# Altium footprint library WR-TBL_Pluggable Connector_3.81mm.PcbLib: 201 footprints (part 10 of 13)
Each footprint in its own frame and in the unit in brackets; x right, y up, seen from the top. Pads: shape width x height; smd on the part's side, far side on the other; paste and mask are expansions set on the pad; w line width, h text height; cw(c..) or ccw(c..) is an arc to the next point about the centre after c.
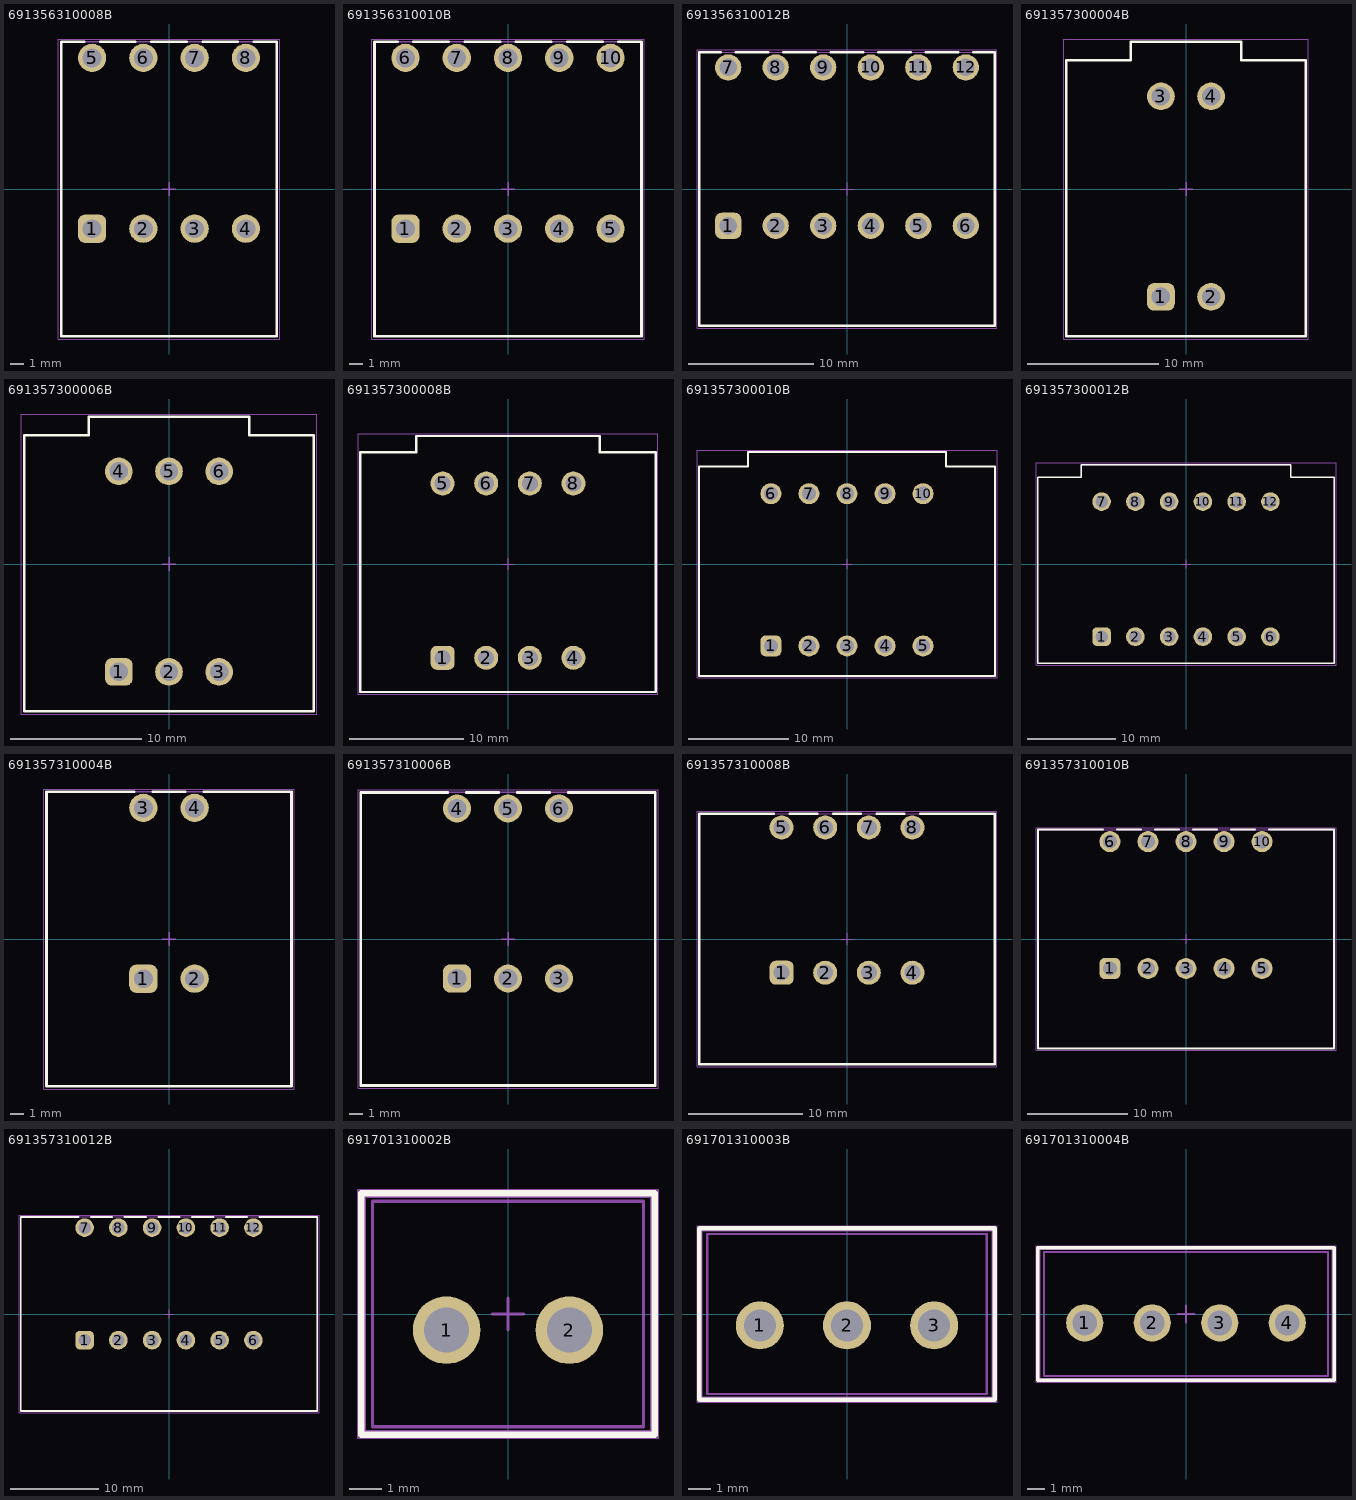
[diagram p9: the footprints below, top view; thin cyan lines are the x and y axes]

## 691356310008B [mm] "Double Level Horizontal Male PCB Header, pitch 3.81mm, 08p"
height 22.4
pads (8):
  rrect50% 2.1x2.1 hole 1.4: 1(-5.715,-2.95)
  round 2.1 hole 1.4: 2(-1.905,-2.95) 3(1.905,-2.95) 4(5.715,-2.95) 5(-5.715,9.75) 6(-1.905,9.75) 7(1.905,9.75) 8(5.715,9.75)
Top Overlay:
  lines w0.2: -6.315,10.95 -8.015,10.95 -8.015,-10.95 8.015,-10.95 8.015,10.95 6.315,10.95 ; -5.115,10.95 -2.505,10.95 ; -1.305,10.95 1.305,10.95 ; 2.505,10.95 5.115,10.95
Top Assembly:
  lines w0.1: -8.015,-10.95 8.015,-10.95 8.015,10.95 -8.015,10.95 -8.015,-10.95
Top Designator:
  text ".Designator" at -3.647,-0.357 h1
Top 3D Body:
  lines w0.1: -8.015,-10.95 -8.015,10.95 8.015,10.95 8.015,-10.95 -8.015,-10.95
Top Courtyard:
  lines w0.05: -8.215,-11.15 8.215,-11.15 8.215,11.15 -8.215,11.15 -8.215,-11.15
Top Component Center:
  lines w0.1: -0.5,0 0.5,0 ; 0,-0.5 0,0.5
3D body "691356310008B.stp": height 22.5, standoff -3.3, extent -8.015,-10.95 8.015,10.95

## 691356310010B [mm] "Double Level Horizontal Male PCB Header, pitch 3.81mm, 10p"
height 22.4
pads (10):
  rrect50% 2.1x2.1 hole 1.4: 1(-7.62,-2.95)
  round 2.1 hole 1.4: 2(-3.81,-2.95) 3(0,-2.95) 4(3.81,-2.95) 5(7.62,-2.95) 6(-7.62,9.75) 7(-3.81,9.75) 8(0,9.75) 9(3.81,9.75) 10(7.62,9.75)
Top Overlay:
  lines w0.2: -8.22,10.95 -9.92,10.95 -9.92,-10.95 9.92,-10.95 9.92,10.95 8.22,10.95 ; -7.02,10.95 -4.41,10.95 ; -3.21,10.95 -0.6,10.95 ; 0.6,10.95 3.21,10.95 ; 4.41,10.95 7.02,10.95
Top Assembly:
  lines w0.1: -9.92,-10.95 -9.92,10.95 9.92,10.95 9.92,-10.95 -9.92,-10.95
Top Designator:
  text ".Designator" at -3.647,-0.357 h1
Top 3D Body:
  lines w0.1: -9.92,-10.95 9.92,-10.95 9.92,10.95 -9.92,10.95 -9.92,-10.95
Top Courtyard:
  lines w0.05: -10.12,-11.15 -10.12,11.15 10.12,11.15 10.12,-11.15 -10.12,-11.15
Top Component Center:
  lines w0.1: -0.5,0 0.5,0 ; 0,-0.5 0,0.5
3D body "691356310010B.stp": height 22.5, standoff -3.3, extent -9.92,-10.95 9.92,10.95

## 691356310012B [mm] "Double Level Horizontal Male PCB Header, pitch 3.81mm, 12p"
height 22.4
pads (12):
  rrect50% 2.1x2.1 hole 1.4: 1(-9.525,-2.95)
  round 2.1 hole 1.4: 2(-5.715,-2.95) 3(-1.905,-2.95) 4(1.905,-2.95) 5(5.715,-2.95) 6(9.525,-2.95) 7(-9.525,9.75) 8(-5.715,9.75) 9(-1.905,9.75) 10(1.905,9.75) 11(5.715,9.75) 12(9.525,9.75)
Top Overlay:
  lines w0.2: -10.125,10.95 -11.825,10.95 -11.825,-10.95 11.825,-10.95 11.825,10.95 10.125,10.95 ; -8.925,10.95 -6.315,10.95 ; -5.115,10.95 -2.505,10.95 ; -1.305,10.95 1.305,10.95 ; 2.505,10.95 5.115,10.95 ; 6.315,10.95 8.925,10.95
Top Assembly:
  lines w0.1: -11.825,-10.95 11.825,-10.95 11.825,10.95 -11.825,10.95 -11.825,-10.95
Top Designator:
  text ".Designator" at -3.647,-0.357 h1
Top 3D Body:
  lines w0.1: -11.825,-10.95 -11.825,10.95 11.825,10.95 11.825,-10.95 -11.825,-10.95
Top Courtyard:
  lines w0.05: -12.025,-11.15 12.025,-11.15 12.025,11.15 -12.025,11.15 -12.025,-11.15
Top Component Center:
  lines w0.1: -0.5,0 0.5,0 ; 0,-0.5 0,0.5
3D body "691356310012B.stp": height 22.5, standoff -3.3, extent -11.825,-10.95 11.825,10.95

## 691357300004B [mm] "Double Level Vertical Male PCB Header with Flanges, pitch 3.81mm, 04p"
height 21.9
pads (4):
  rrect50% 2.1x2.1 hole 1.4: 1(-1.905,-8.2)
  round 2.1 hole 1.4: 2(1.905,-8.2) 3(-1.905,7.04) 4(1.905,7.04)
Top Overlay:
  lines w0.2: -9.105,-11.2 9.105,-11.2 9.105,9.78 4.2,9.78 4.2,11.2 -4.2,11.2 -4.2,9.78 -9.105,9.78 -9.105,-11.2
Top Assembly:
  lines w0.1: -9.105,-11.2 -9.105,9.78 -4.2,9.78 -4.2,11.2 4.2,11.2 4.2,9.78 9.105,9.78 9.105,-11.2 -9.105,-11.2
Top Designator:
  text ".Designator" at -3.647,-0.357 h1
Top 3D Body:
  lines w0.1: -9.105,-11.2 9.105,-11.2 9.105,9.78 4.2,9.78 4.2,11.2 -4.2,11.2 -4.2,9.78 -9.105,9.78 -9.105,-11.2
Top Courtyard:
  lines w0.05: -9.305,-11.4 9.305,-11.4 9.305,11.4 -9.305,11.4 -9.305,-11.4
Top Component Center:
  lines w0.1: -0.5,0 0.5,0 ; 0,-0.5 0,0.5
3D body "691357300004B.stp": height 21.95, standoff -3.35, extent -9.105,-11.2 9.105,11.2

## 691357300006B [mm] "Double Level Vertical Male PCB Header with Flanges, pitch 3.81mm, 06p"
height 21.9
pads (6):
  rrect50% 2.1x2.1 hole 1.4: 1(-3.81,-8.2)
  round 2.1 hole 1.4: 2(0,-8.2) 3(3.81,-8.2) 4(-3.81,7.04) 5(0,7.04) 6(3.81,7.04)
Top Overlay:
  lines w0.2: -11.01,-11.2 11.01,-11.2 11.01,9.78 6.105,9.78 6.105,11.2 -6.105,11.2 -6.105,9.78 -11.01,9.78 -11.01,-11.2
Top Assembly:
  lines w0.1: -11.01,-11.2 -11.01,9.78 -6.105,9.78 -6.105,11.2 6.105,11.2 6.105,9.78 11.01,9.78 11.01,-11.2 -11.01,-11.2
Top Designator:
  text ".Designator" at -3.647,-0.357 h1
Top 3D Body:
  lines w0.1: -11.01,-11.2 11.01,-11.2 11.01,9.78 6.105,9.78 6.105,11.2 -6.105,11.2 -6.105,9.78 -11.01,9.78 -11.01,-11.2
Top Courtyard:
  lines w0.05: -11.21,-11.4 11.21,-11.4 11.21,11.4 -11.21,11.4 -11.21,-11.4
Top Component Center:
  lines w0.1: -0.5,0 0.5,0 ; 0,-0.5 0,0.5
3D body "691357300006B.stp": height 21.95, standoff -3.35, extent -11.01,-11.2 11.01,11.2

## 691357300008B [mm] "Double Level Vertical Male PCB Header with Flanges, pitch 3.81mm, 08p"
height 21.9
pads (8):
  rrect50% 2.1x2.1 hole 1.4: 1(-5.715,-8.2)
  round 2.1 hole 1.4: 2(-1.905,-8.2) 3(1.905,-8.2) 4(5.715,-8.2) 5(-5.715,7.04) 6(-1.905,7.04) 7(1.905,7.04) 8(5.715,7.04)
Top Overlay:
  lines w0.2: -12.915,-11.2 -12.915,9.78 -8.01,9.78 -8.01,11.2 8.01,11.2 8.01,9.78 12.915,9.78 12.915,-11.2 -12.915,-11.2
Top Assembly:
  lines w0.1: -12.915,-11.2 12.915,-11.2 12.915,9.78 8.01,9.78 8.01,11.2 -8.01,11.2 -8.01,9.78 -12.915,9.78 -12.915,-11.2
Top Designator:
  text ".Designator" at -3.647,-0.357 h1
Top 3D Body:
  lines w0.1: -12.915,-11.2 -12.915,9.78 -8.01,9.78 -8.01,11.2 8.01,11.2 8.01,9.78 12.915,9.78 12.915,-11.2 -12.915,-11.2
Top Courtyard:
  lines w0.05: -13.115,-11.4 -13.115,11.4 13.115,11.4 13.115,-11.4 -13.115,-11.4
Top Component Center:
  lines w0.1: -0.5,0 0.5,0 ; 0,-0.5 0,0.5
3D body "691357300008B.stp": height 21.95, standoff -3.35, extent -12.915,-11.2 12.915,11.2

## 691357300010B [mm] "Double Level Vertical Male PCB Header with Flanges, pitch 3.81mm, 10p"
height 21.9
pads (10):
  rrect50% 2.1x2.1 hole 1.4: 1(-7.62,-8.2)
  round 2.1 hole 1.4: 2(-3.81,-8.2) 3(0,-8.2) 4(3.81,-8.2) 5(7.62,-8.2) 6(-7.62,7.04) 7(-3.81,7.04) 8(0,7.04) 9(3.81,7.04) 10(7.62,7.04)
Top Overlay:
  lines w0.2: -14.82,-11.2 14.82,-11.2 14.82,9.78 9.915,9.78 9.915,11.2 -9.915,11.2 -9.915,9.78 -14.82,9.78 -14.82,-11.2
Top Assembly:
  lines w0.1: -14.82,-11.2 -14.82,9.78 -9.915,9.78 -9.915,11.2 9.915,11.2 9.915,9.78 14.82,9.78 14.82,-11.2 -14.82,-11.2
Top Designator:
  text ".Designator" at -3.647,-0.357 h1
Top 3D Body:
  lines w0.1: -14.82,-11.2 14.82,-11.2 14.82,9.78 9.915,9.78 9.915,11.2 -9.915,11.2 -9.915,9.78 -14.82,9.78 -14.82,-11.2
Top Courtyard:
  lines w0.05: -15.02,-11.4 15.02,-11.4 15.02,11.4 -15.02,11.4 -15.02,-11.4
Top Component Center:
  lines w0.1: -0.5,0 0.5,0 ; 0,-0.5 0,0.5
3D body "691357300010B.stp": height 21.95, standoff -3.35, extent -14.82,-11.2 14.82,11.2

## 691357300012B [mm] "Double Level Vertical Male PCB Header with Flanges, pitch 3.81mm, 12p"
height 21.9
pads (12):
  rrect50% 2.1x2.1 hole 1.4: 1(-9.525,-8.2)
  round 2.1 hole 1.4: 2(-5.715,-8.2) 3(-1.905,-8.2) 4(1.905,-8.2) 5(5.715,-8.2) 6(9.525,-8.2) 7(-9.525,7.04) 8(-5.715,7.04) 9(-1.905,7.04) 10(1.905,7.04) 11(5.715,7.04) 12(9.525,7.04)
Top Overlay:
  lines w0.2: -16.725,-11.2 16.725,-11.2 16.725,9.78 11.82,9.78 11.82,11.2 -11.82,11.2 -11.82,9.78 -16.725,9.78 -16.725,-11.2
Top Assembly:
  lines w0.1: -16.725,-11.2 -16.725,9.78 -11.82,9.78 -11.82,11.2 11.82,11.2 11.82,9.78 16.725,9.78 16.725,-11.2 -16.725,-11.2
Top Designator:
  text ".Designator" at -3.647,-0.357 h1
Top 3D Body:
  lines w0.1: -16.725,-11.2 16.725,-11.2 16.725,9.78 11.82,9.78 11.82,11.2 -11.82,11.2 -11.82,9.78 -16.725,9.78 -16.725,-11.2
Top Courtyard:
  lines w0.05: -16.925,-11.4 16.925,-11.4 16.925,11.4 -16.925,11.4 -16.925,-11.4
Top Component Center:
  lines w0.1: -0.5,0 0.5,0 ; 0,-0.5 0,0.5
3D body "691357300012B.stp": height 21.95, standoff -3.35, extent -16.725,-11.2 16.725,11.2

## 691357310004B [mm] "Double Level Horizontal Male PCB Header with Flanges, pitch 3.81mm, 04p"
height 22.4
pads (4):
  rrect50% 2.1x2.1 hole 1.4: 1(-1.905,-2.95)
  round 2.1 hole 1.4: 2(1.905,-2.95) 3(-1.905,9.75) 4(1.905,9.75)
Top Overlay:
  lines w0.2: -2.605,10.95 -9.105,10.95 -9.105,-10.95 9.105,-10.95 9.105,10.95 2.605,10.95 ; -1.205,10.95 1.205,10.95
Top Assembly:
  lines w0.1: -9.105,-10.95 9.105,-10.95 9.105,10.95 -9.105,10.95 -9.105,-10.95
Top Designator:
  text ".Designator" at -3.647,-0.357 h1
Top 3D Body:
  lines w0.1: -9.105,-10.95 -9.105,10.95 9.105,10.95 9.105,-10.95 -9.105,-10.95
Top Courtyard:
  lines w0.05: -9.305,-11.15 -9.305,11.15 9.305,11.15 9.305,-11.15 -9.305,-11.15
Top Component Center:
  lines w0.1: -0.5,0 0.5,0 ; 0,-0.5 0,0.5
3D body "691357310004B.stp": height 22.5, standoff -3.3, extent -9.105,-10.95 9.105,10.95

## 691357310006B [mm] "Double Level Horizontal Male PCB Header with Flanges, pitch 3.81mm, 06p"
height 22.4
pads (6):
  rrect50% 2.1x2.1 hole 1.4: 1(-3.81,-2.95)
  round 2.1 hole 1.4: 2(0,-2.95) 3(3.81,-2.95) 4(-3.81,9.75) 5(0,9.75) 6(3.81,9.75)
Top Overlay:
  lines w0.2: -4.51,10.95 -11.01,10.95 -11.01,-10.95 11.01,-10.95 11.01,10.95 4.51,10.95 ; -3.11,10.95 -0.7,10.95 ; 0.7,10.95 3.11,10.95
Top Assembly:
  lines w0.1: -11.01,-10.95 -11.01,10.95 11.01,10.95 11.01,-10.95 -11.01,-10.95
Top Designator:
  text ".Designator" at -3.647,-0.357 h1
Top 3D Body:
  lines w0.1: -11.01,-10.95 11.01,-10.95 11.01,10.95 -11.01,10.95 -11.01,-10.95
Top Courtyard:
  lines w0.05: -11.21,-11.15 11.21,-11.15 11.21,11.15 -11.21,11.15 -11.21,-11.15
Top Component Center:
  lines w0.1: -0.5,0 0.5,0 ; 0,-0.5 0,0.5
3D body "691357310006B.stp": height 22.5, standoff -3.3, extent -11.01,-10.95 11.01,10.95

## 691357310008B [mm] "Double Level Horizontal Male PCB Header with Flanges, pitch 3.81mm, 08p"
height 22.4
pads (8):
  rrect50% 2.1x2.1 hole 1.4: 1(-5.715,-2.95)
  round 2.1 hole 1.4: 2(-1.905,-2.95) 3(1.905,-2.95) 4(5.715,-2.95) 5(-5.715,9.75) 6(-1.905,9.75) 7(1.905,9.75) 8(5.715,9.75)
Top Overlay:
  lines w0.2: -6.415,10.95 -12.915,10.95 -12.915,-10.95 12.915,-10.95 12.915,10.95 6.415,10.95 ; -5.015,10.95 -2.605,10.95 ; -1.205,10.95 1.205,10.95 ; 2.605,10.95 5.015,10.95
Top Assembly:
  lines w0.1: -12.915,-10.95 12.915,-10.95 12.915,10.95 -12.915,10.95 -12.915,-10.95
Top Designator:
  text ".Designator" at -3.647,-0.357 h1
Top 3D Body:
  lines w0.1: -12.915,-10.95 -12.915,10.95 12.915,10.95 12.915,-10.95 -12.915,-10.95
Top Courtyard:
  lines w0.05: -13.115,-11.15 -13.115,11.15 13.115,11.15 13.115,-11.15 -13.115,-11.15
Top Component Center:
  lines w0.1: -0.5,0 0.5,0 ; 0,-0.5 0,0.5
3D body "691357310008B.stp": height 22.5, standoff -3.3, extent -12.915,-10.95 12.915,10.95

## 691357310010B [mm] "Double Level Horizontal Male PCB Header with Flanges, pitch 3.81mm, 10p"
height 22.4
pads (10):
  rrect50% 2.1x2.1 hole 1.4: 1(-7.62,-2.95)
  round 2.1 hole 1.4: 2(-3.81,-2.95) 3(0,-2.95) 4(3.81,-2.95) 5(7.62,-2.95) 6(-7.62,9.75) 7(-3.81,9.75) 8(0,9.75) 9(3.81,9.75) 10(7.62,9.75)
Top Overlay:
  lines w0.2: -8.32,10.95 -14.82,10.95 -14.82,-10.95 14.82,-10.95 14.82,10.95 8.32,10.95 ; -6.92,10.95 -4.51,10.95 ; -3.11,10.95 -0.7,10.95 ; 0.7,10.95 3.11,10.95 ; 4.51,10.95 6.92,10.95
Top Assembly:
  lines w0.1: -14.82,-10.95 14.82,-10.95 14.82,10.95 -14.82,10.95 -14.82,-10.95
Top Designator:
  text ".Designator" at -3.647,-0.357 h1
Top 3D Body:
  lines w0.1: -14.82,-10.95 -14.82,10.95 14.82,10.95 14.82,-10.95 -14.82,-10.95
Top Courtyard:
  lines w0.05: -15.02,-11.15 -15.02,11.15 15.02,11.15 15.02,-11.15 -15.02,-11.15
Top Component Center:
  lines w0.1: -0.5,0 0.5,0 ; 0,-0.5 0,0.5
3D body "691357310010B.stp": height 22.5, standoff -3.3, extent -14.82,-10.95 14.82,10.95

## 691357310012B [mm] "Double Level Horizontal Male PCB Header with Flanges, pitch 3.81mm, 12p"
height 22.4
pads (12):
  rrect50% 2.1x2.1 hole 1.4: 1(-9.525,-2.95)
  round 2.1 hole 1.4: 2(-5.715,-2.95) 3(-1.905,-2.95) 4(1.905,-2.95) 5(5.715,-2.95) 6(9.525,-2.95) 7(-9.525,9.75) 8(-5.715,9.75) 9(-1.905,9.75) 10(1.905,9.75) 11(5.715,9.75) 12(9.525,9.75)
Top Overlay:
  lines w0.2: -10.225,10.95 -16.725,10.95 -16.725,-10.95 16.725,-10.95 16.725,10.95 10.225,10.95 ; -8.825,10.95 -6.415,10.95 ; -5.015,10.95 -2.605,10.95 ; -1.205,10.95 1.205,10.95 ; 2.605,10.95 5.015,10.95 ; 6.415,10.95 8.825,10.95
Top Assembly:
  lines w0.1: -16.725,-10.95 16.725,-10.95 16.725,10.95 -16.725,10.95 -16.725,-10.95
Top Designator:
  text ".Designator" at -3.647,-0.357 h1
Top 3D Body:
  lines w0.1: -16.725,-10.95 -16.725,10.95 16.725,10.95 16.725,-10.95 -16.725,-10.95
Top Courtyard:
  lines w0.05: -16.925,-11.15 -16.925,11.15 16.925,11.15 16.925,-11.15 -16.925,-11.15
Top Component Center:
  lines w0.1: -0.5,0 0.5,0 ; 0,-0.5 0,0.5
3D body "691357310012B.stp": height 22.5, standoff -3.3, extent -16.725,-10.95 16.725,10.95

## 691701310002B [mm] "Vertical PCB Header THR Type, pitch 3.81mm, 02p"
height 9.2
pads (2):
  round 2.1 hole 1.4: 1(-1.905,-0.5) 2(1.905,-0.5)
Top Overlay:
  lines w0.2: -4.555,-3.75 4.555,-3.75 4.555,3.75 -4.555,3.75 -4.555,-3.75
Top Paste:
  region: 0.355,1.75 3.455,1.75 3.455,-2.75 0.355,-2.75
  region: -3.455,1.75 -0.355,1.75 -0.355,-2.75 -3.455,-2.75
Assembly Notes:
  text "Stencil thickness : 120 μm" at -5.156,-4.701 h1
Top Assembly:
  lines w0.1: -4.455,-3.65 4.455,-3.65 4.455,3.65 -4.455,3.65 -4.455,-3.65
Top Designator:
  text ".Designator" at -3.647,-0.357 h1
Top 3D Body:
  lines w0.1: -4.205,-3.5 4.205,-3.5 4.205,3.5 -4.205,3.5 -4.205,-3.5
Top Courtyard:
  lines w0.05: -4.655,-3.85 4.655,-3.85 4.655,3.85 -4.655,3.85 -4.655,-3.85
Top Component Center:
  lines w0.1: -0.5,0 0.5,0 ; 0,-0.5 0,0.5
3D body "691701310002B.stp": height 9.25, standoff -2.55, extent -4.405,-3.5 4.405,3.5

## 691701310003B [mm] "Vertical PCB Header THR Type, pitch 3.81mm, 03p"
height 9.2
pads (3):
  round 2.1 hole 1.4: 1(-3.81,-0.5) 2(0,-0.5) 3(3.81,-0.5)
Top Overlay:
  lines w0.2: -6.46,-3.75 6.46,-3.75 6.46,3.75 -6.46,3.75 -6.46,-3.75
Top Paste:
  region: -1.55,1.75 1.55,1.75 1.55,-2.75 -1.55,-2.75
  region: -5.36,1.75 -2.26,1.75 -2.26,-2.75 -5.36,-2.75
  region: 2.26,1.75 5.36,1.75 5.36,-2.75 2.26,-2.75
Assembly Notes:
  text "Stencil thickness : 120 μm" at -5.156,-4.701 h1
Top Assembly:
  lines w0.1: -6.36,-3.65 6.36,-3.65 6.36,3.65 -6.36,3.65 -6.36,-3.65
Top Designator:
  text ".Designator" at -3.647,-0.357 h1
Top 3D Body:
  lines w0.1: -6.11,-3.5 6.11,-3.5 6.11,3.5 -6.11,3.5 -6.11,-3.5
Top Courtyard:
  lines w0.05: -6.56,-3.85 6.56,-3.85 6.56,3.85 -6.56,3.85 -6.56,-3.85
Top Component Center:
  lines w0.1: -0.5,0 0.5,0 ; 0,-0.5 0,0.5
3D body "691701310003B.stp": height 9.25, standoff -2.55, extent -6.31,-3.5 6.31,3.5

## 691701310004B [mm] "Vertical PCB Header THR Type, pitch 3.81mm, 04p"
height 9.2
pads (4):
  round 2.1 hole 1.4: 1(-5.715,-0.5) 2(-1.905,-0.5) 3(1.905,-0.5) 4(5.715,-0.5)
Top Overlay:
  lines w0.2: -8.365,-3.75 8.365,-3.75 8.365,3.75 -8.365,3.75 -8.365,-3.75
Top Paste:
  region: -3.455,1.75 -0.355,1.75 -0.355,-2.75 -3.455,-2.75
  region: -7.265,1.75 -4.165,1.75 -4.165,-2.75 -7.265,-2.75
  region: 0.355,1.75 3.455,1.75 3.455,-2.75 0.355,-2.75
  region: 4.165,1.75 7.265,1.75 7.265,-2.75 4.165,-2.75
Assembly Notes:
  text "Stencil thickness : 120 μm" at -5.156,-4.701 h1
Top Assembly:
  lines w0.1: -8.265,-3.65 8.265,-3.65 8.265,3.65 -8.265,3.65 -8.265,-3.65
Top Designator:
  text ".Designator" at -3.647,-0.357 h1
Top 3D Body:
  lines w0.1: -8.015,-3.5 8.015,-3.5 8.015,3.5 -8.015,3.5 -8.015,-3.5
Top Courtyard:
  lines w0.05: -8.465,-3.85 8.465,-3.85 8.465,3.85 -8.465,3.85 -8.465,-3.85
Top Component Center:
  lines w0.1: -0.5,0 0.5,0 ; 0,-0.5 0,0.5
3D body "691701310004B.stp": height 9.25, standoff -2.55, extent -8.215,-3.5 8.215,3.5